# EAGLE library part 6200XX21121_62004421121 (library WR-PHD)
WR-PHD 2.00 mm THT Dual Pin Header Article Properties Pins 4 unitless; 6 unitless; 8 unitless; 10 unitless; 16 unitless; 20 unitless; 24 unitless; 28 unitless; 32 unitless; 40 unitless; 44 unitless General Information Operating Temperature -40 °C up to +105 °C Pitch 2 mm Durability 50 Cycles Rows Dual Gender Pin Header Type Straight Material Properties Insulator Material PA9T Insulator Flammability Rating UL94 V-0 Contact Material Copper Alloy Contact Plating Gold Contact Type Stamped Certification UL Approval E323964 Packaging Properties Packaging Bag Electrical Properties IR 2 A Withstanding Voltage 500 V (AC) Contact Resistance 20 mΩ RISO 1000 MΩ <https://www.we-online.com/components/media/o57938v209%20Family_WR-PHD_Dual_Pin_Header_6200xx21121.jpg> Details see: www.we-online.com/en/components/products/PHD_2_00_THT_DUAL_PIN_HEADER_6200XX21121 <www.we-online.com/catalog/PHD_2_00_THT_DUAL_PIN_HEADER_6200XX21121/?utm_source=eagle_model&utm_medium=description_link&utm_campaign=eisos_eagle> Updated by Ella 2024-01-31 2024 (C) Würth Elektronik
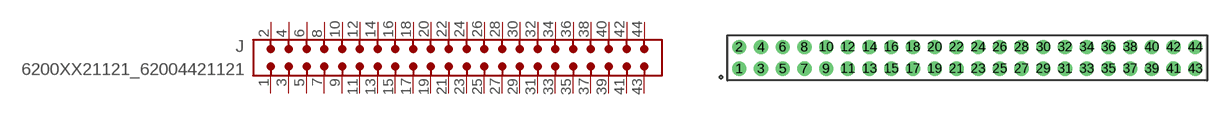
[diagram p321: symbol with the pads of 62004421121; footprint 62004421121]

Designator prefix J

## 6200XX21121_62004421121 (DATASHEET-URL: https://www.we-online.com/redexpert/spec/62004421121?ae; GENDER: Pin Header; IR: 2A; MOUNT: THT; PACKAGING: Bag; PART-NUMBER: 62004421121; PINS: 44; PITCH: 2.00 mm; ROWS: Dual; TYPE: Straight; VALUE: 62004421121)  [62004421121]
1  1  pas
2  2  pas
3  3  pas
4  4  pas
5  5  pas
6  6  pas
7  7  pas
8  8  pas
9  9  pas
10  10  pas
11  11  pas
12  12  pas
13  13  pas
14  14  pas
15  15  pas
16  16  pas
17  17  pas
18  18  pas
19  19  pas
20  20  pas
21  21  pas
22  22  pas
23  23  pas
24  24  pas
25  25  pas
26  26  pas
27  27  pas
28  28  pas
29  29  pas
30  30  pas
31  31  pas
32  32  pas
33  33  pas
34  34  pas
35  35  pas
36  36  pas
37  37  pas
38  38  pas
39  39  pas
40  40  pas
41  41  pas
42  42  pas
43  43  pas
44  44  pas

## Footprint 62004421121 (pad centres in mm)
WR-PHD 2.00 mm THT Dual Pin Header, 44 Pins
drill 0.8: 1 -21,-1; 2 -21,1; 3 -19,-1; 4 -19,1; 5 -17,-1; 6 -17,1; 7 -15,-1; 8 -15,1; 9 -13,-1; 10 -13,1; 11 -11,-1; 12 -11,1; 13 -9,-1; 14 -9,1; 15 -7,-1; 16 -7,1; 17 -5,-1; 18 -5,1; 19 -3,-1; 20 -3,1; 21 -1,-1; 22 -1,1; 23 1,-1; 24 1,1; 25 3,-1; 26 3,1; 27 5,-1; 28 5,1; 29 7,-1; 30 7,1; 31 9,-1; 32 9,1; 33 11,-1; 34 11,1; 35 13,-1; 36 13,1; 37 15,-1; 38 15,1; 39 17,-1; 40 17,1; 41 19,-1; 42 19,1; 43 21,-1; 44 21,1